# Altium footprint library PcbLib1.PcbLib: 37 footprints (part 1 of 3)
Each footprint in its own frame and in the unit in brackets; x right, y up, seen from the top. Pads: shape width x height; smd on the part's side, far side on the other; paste and mask are expansions set on the pad; w line width, h text height; cw(c..) or ccw(c..) is an arc to the next point about the centre after c.
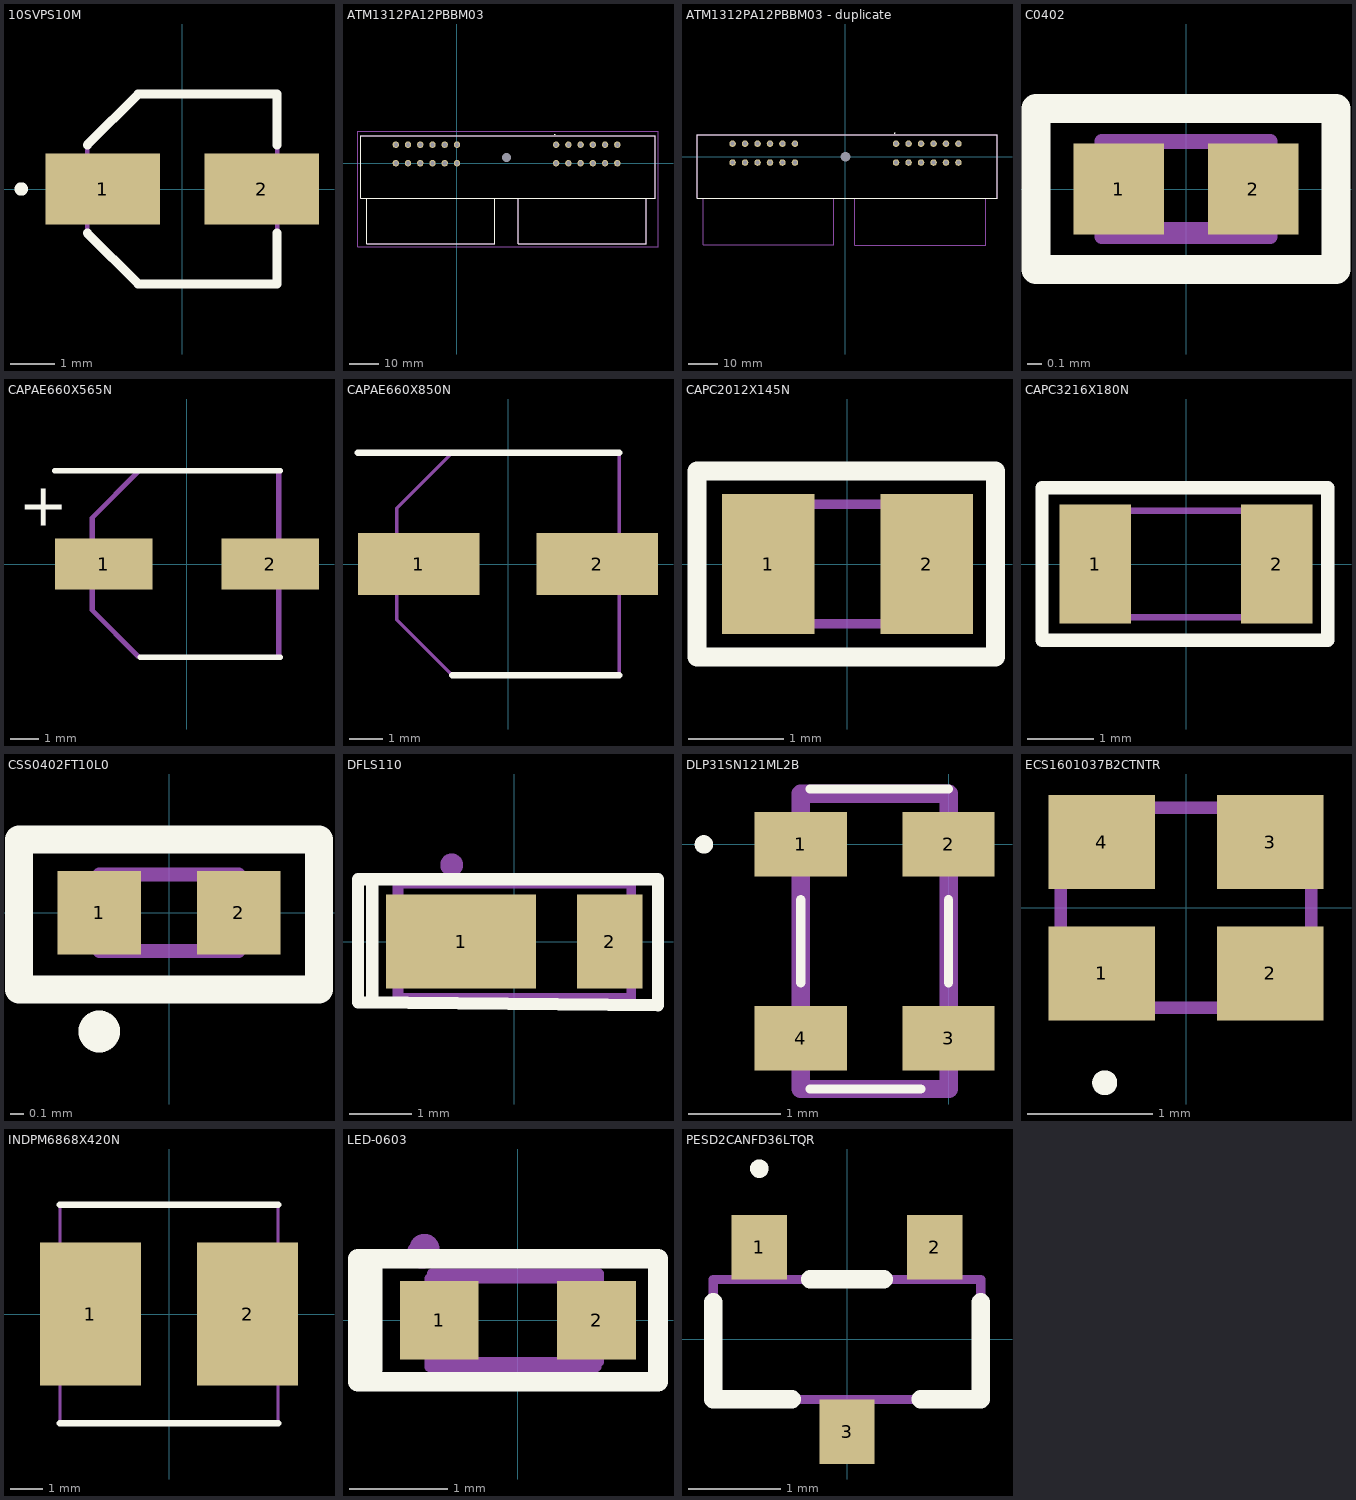
[diagram p0: the footprints below, top view; thin cyan lines are the x and y axes]

## 10SVPS10M [mm]
pads (2):
  rect 2.6x1.6 smd: 1(-1.8,0) 2(1.8,0)
Top Overlay:
  lines w0.2: -2.15,-1 -1,-2.15 2.15,-2.15 2.15,-1 ; -2.15,1 -1,2.15 2.15,2.15 2.15,1 ; -3.7,0 cw(c-3.65,0) -3.6,0 ; -3.7,0 ccw(c-3.65,0) -3.6,0 ; -3.7,0 cw(c-3.65,0) -3.6,0
Mechanical 13:
  lines w0.1: -2.15,-1 -2.15,1 -1,2.15 2.15,2.15 2.15,-2.15 -1,-2.15 -2.15,-1
  text ".Designator" at -2.182,-0.106 h1
3D body "4SVP33M.stp": height 5.43, standoff 0.03, extent -2.5,-2.15 2.5,2.15

## ATM1312PA12PBBM03 [mm]
pads (25):
  round 2.2 hole 1.4: A1(0,0) A2(-4.2,0) A3(-8.4,0) A4(-12.6,0) A5(-16.8,0) A6(-21,0) A7(-21,6.35) A8(-16.8,6.35) A9(-12.6,6.35) A10(-8.4,6.35) A11(-4.2,6.35) A12(0,6.35) B1(34.05,6.35) B2(38.25,6.35) B3(42.45,6.35) B4(46.65,6.35) B5(50.85,6.35) B6(55.05,6.35) B7(55.05,0) B8(50.85,0) B9(46.65,0) B10(42.45,0) B11(38.25,0) B12(34.05,0)
  round 1.6 hole 3.2 unplated: MH1(17.02,1.98)
Top Overlay:
  lines w0.1: -30.98,-11.95 -30.98,-27.65 13.02,-27.65 13.02,-11.95 ; 21.02,-11.95 21.02,-27.65 65.02,-27.65 65.02,-11.95 ; -32.975,-11.95 -32.975,9.35 68.025,9.35 68.025,-11.95 -32.975,-11.95 ; 33.55,9.85 cw(c33.55,9.9) 33.55,9.95 cw(c33.55,9.9) 33.55,9.85
Mechanical 15:
  lines w0.2: -30.98,-11.95 -30.98,-27.65 13.02,-27.65 13.02,-11.95 ; 21.02,-11.95 21.02,-27.65 65.02,-27.65 65.02,-11.95 ; -32.975,-11.95 -32.975,9.35 68.025,9.35 68.025,-11.95 -32.975,-11.95
Mechanical 20:
  lines w0.1: -33.975,-28.65 -33.975,10.95 69.025,10.95 69.025,-28.65 -33.975,-28.65
3D body "c-atm13-12pa-12pb-bm03-3d-c3d.STP": height 15.1, standoff -19.9, extent -36.243,-25.851 72.057,11.049

## ATM1312PA12PBBM03 - duplicate [mm]
pads (25):
  round 2.2 hole 1.4: A1(-17.02,-1.98) A2(-21.22,-1.98) A3(-25.42,-1.98) A4(-29.62,-1.98) A5(-33.82,-1.98) A6(-38.02,-1.98) A7(-38.02,4.37) A8(-33.82,4.37) A9(-29.62,4.37) A10(-25.42,4.37) A11(-21.22,4.37) A12(-17.02,4.37) B1(17.03,4.37) B2(21.23,4.37) B3(25.43,4.37) B4(29.63,4.37) B5(33.83,4.37) B6(38.03,4.37) B7(38.03,-1.98) B8(33.83,-1.98) B9(29.63,-1.98) B10(25.43,-1.98) B11(21.23,-1.98) B12(17.03,-1.98)
  round 1.6 hole 3.2 unplated: ""(0,0)
Top Overlay:
  lines w0.1: -49.995,-13.93 -49.995,7.37 51.005,7.37 51.005,-13.93 -49.995,-13.93 ; 16.53,7.87 cw(c16.53,7.92) 16.53,7.97 cw(c16.53,7.92) 16.53,7.87
Mechanical 13:
  lines w0.2: -47.943,-13.93 -47.943,-29.63 -3.943,-29.63 -3.943,-13.93 ; 3.181,-14.057 3.181,-29.757 47.181,-29.757 47.181,-14.057 ; -49.995,-13.93 -49.995,7.37 51.005,7.37 51.005,-13.93 -49.995,-13.93
  text ".Designator" at -6.098,-7.187 h1.52
3D body "ATM13-12PA-12PB-BM03.stp": height 27.1, standoff -7.9, extent -54.059,-30.653 54.241,6.247

## C0402 [mm]
pads (2):
  rect 0.62x0.62 smd: 1(-0.46,0) 2(0.46,0)
Top Overlay:
  lines w0.2: -1.025,-0.55 -1.025,0.55 1.025,0.55 1.025,-0.55 -1.025,-0.55
Mechanical 13:
  lines w0.1: -0.55,-0.275 -0.55,0.325 0.525,0.325 0.525,-0.275 -0.55,-0.275
  text ".Designator" at -1.125,-0.317 h1
Mechanical 29:
  lines w0.1: -0.575,-0.325 0.575,-0.325 0.575,0.325 -0.575,0.325 -0.575,-0.325
  text "'.Designator'" at -0.7,-0.158 h0.5
Mechanical 30:
  text ".Comment" at -1.075,-1.05 h0.5
3D body "C0402C104K4RAC-TU.stp": height 0.55, standoff 0, extent -0.525,-0.275 0.525,0.275

## CAPAE660X565N [mm]
pads (2):
  rect 3.45x1.8 smd: 1(-2.95,0) 2(2.95,0)
Top Overlay:
  lines w0.2: -4.675,3.3 3.3,3.3 ; -1.65,-3.3 3.3,-3.3
  text "+" at -5.946,1.35 h1.52
Mechanical 13:
  lines w0.1: -3.4,-1.65 -3.4,1.65 -1.75,3.3 3.2,3.3 3.2,-3.3 -1.75,-3.3 -3.4,-1.65
  text ".Designator" at -3.321,-0.763 h1.52
Mechanical 29:
  lines w0.1: -3.3,-1.65 -1.65,-3.3 3.3,-3.3 3.3,3.3 -1.65,3.3 -3.3,1.65 -3.3,-1.65
  text ".Designator" at -3.221,-0.763 h1.52
Mechanical 30:
  text ".Comment" at -3.4,-2.125 h1
3D body "EXV106M050A9GAA.stp": height 5.66, standoff 0, extent -3.8,-3.4 3.8,3.4

## CAPAE660X850N [mm]
pads (2):
  rect 3.6x1.85 smd: 1(-2.65,0) 2(2.65,0)
Top Overlay:
  lines w0.2: -4.45,3.3 3.3,3.3 ; -1.65,-3.3 3.3,-3.3
Mechanical 13:
  lines w0.1: -3.3,-1.65 -3.3,1.65 -1.65,3.3 3.3,3.3 3.3,-3.3 -1.65,-3.3 -3.3,-1.65
  text ".Designator" at -3.457,-0.406 h1
3D body "AHA0608150M050R.stp": height 8, standoff 0.03, extent -3.65,-3.3 3.65,3.3

## CAPC2012X145N [mm]
pads (2):
  rect 0.97x1.47 smd: 1(-0.83,0) 2(0.83,0)
Top Overlay:
  lines w0.2: -1.575,-0.975 -1.575,0.975 1.55,0.975 1.55,-0.975 -1.575,-0.975
Mechanical 13:
  lines w0.1: -1,-0.625 -1,0.625 1,0.625 1,-0.625 -1,-0.625
  text ".Designator" at -1.407,-0.456 h1
3D body "GRM21BR71C475KE51L.stp": height 1.45, standoff 0, extent -1,-0.625 1,0.625

## CAPC3216X180N [mm]
pads (2):
  rect 1.07x1.78 smd: 1(-1.36,0) 2(1.36,0)
Top Overlay:
  lines w0.2: 2.125,1.125 2.125,-1.143 -2.159,-1.143 -2.159,1.143 2.125,1.143
Mechanical 13:
  lines w0.1: -1.6,-0.8 -1.6,0.8 1.6,0.8 1.6,-0.8 -1.6,-0.8
  text ".Designator" at -1.832,-0.356 h1
3D body "EMK316BJ475ML-T.stp": height 1.8, standoff 0, extent -1.6,-0.8 1.6,0.8

## CSS0402FT10L0 [mm]
pads (2):
  rect 0.6x0.6 smd: 1(-0.5,0) 2(0.5,0)
Top Overlay:
  lines w0.2: -0.5,-0.9 cw(c-0.5,-0.85) -0.5,-0.8 ; -0.5,-0.9 ccw(c-0.5,-0.85) -0.5,-0.8 ; -0.5,-0.9 cw(c-0.5,-0.85) -0.5,-0.8 ; -1.075,-0.55 -1.075,0.525 1.075,0.525 1.075,-0.55 -1.075,-0.55
Mechanical 13:
  lines w0.1: -0.5,-0.275 -0.5,0.275 0.5,0.275 0.5,-0.275 -0.5,-0.275
  text ".Designator" at -1.757,-0.306 h1
3D body "RES_CSS0402__005-_02OHM_STP.step": height 0.41, standoff 0, extent -0.572,-0.356 0.572,0.356

## DFLS110 [mm]
pads (2):
  rect 2.4x1.5 smd: 1(-0.85,0)
  rect 1.05x1.5 smd: 2(1.525,0)
Top Overlay:
  lines w0.2: -2.275,-0.95 -2.275,1 -2.5,1 ; -2.5,1 2.3,1 2.3,-1.023 -2.5,-0.969 -2.5,1
Mechanical 13:
  lines w0.1: -1.825,-0.875 -1.825,0.9 1.85,0.9 1.85,-0.875 -1.825,-0.875
  text ".Designator" at -1.625,-0.342 h1
Mechanical 29:
  circle w0.254: c-1,1.225 r0.056
  lines w0.1: -1.9,-0.925 -1.9,0.925 1.9,0.925 1.9,-0.925 -1.9,-0.925
  text ".Designator" at -1.7,-0.283 h0.5
Mechanical 30:
  text ".Comment" at -1.775,-1.3 h0.5
3D body "DFLS1100-7.stp": height 0.98, standoff 0, extent -1.85,-0.9 1.85,0.88

## DLP31SN121ML2B [mm]
pads (4):
  rect 1x0.7 smd: 1(-1.6,0) 2(0,0) 3(0,-2.1) 4(-1.6,-2.1)
Top Overlay:
  lines w0.1: -1.6,-1.5 -1.6,-0.6 ; -1.5,-2.65 -0.3,-2.65 ; -1.5,0.6 0,0.6 ; 0,-1.5 0,-0.6 ; -2.7,0 ccw(c-2.65,0) -2.6,0 ccw(c-2.65,0) -2.7,0
Mechanical 13:
  lines w0.2: -1.6,-2.65 0,-2.65 0,0.55 -1.6,0.55 -1.6,-2.65
  text ".Designator" at -2.3,-1.417 h1
3D body "DLP31SN121ML2L.stp": height 1.4, standoff 0, extent -2.03,-2.65 0.43,0.55

## ECS1601037B2CTNTR [mm]
pads (4):
  rect 0.85x0.75 smd: 1(-0.675,-0.525) 2(0.675,-0.525) 3(0.675,0.525) 4(-0.675,0.525)
Top Overlay:
  lines w0.1: -0.7,-1.4 cw(c-0.65,-1.4) -0.6,-1.4 cw(c-0.65,-1.4) -0.7,-1.4
Mechanical 13:
  lines w0.1: -1,-0.8 1,-0.8 1,0.8 -1,0.8 -1,-0.8
  text ".Designator" at -1.207,-0.406 h1
3D body "ECS-160-10-37B2-CTN-TR.stp": height 0.6, standoff 0, extent -1.025,-0.825 1.025,0.825

## INDPM6868X420N [mm]
pads (2):
  rect 3.15x4.45 smd: 1(-2.45,0) 2(2.45,0)
Top Overlay:
  lines w0.2: -3.4,-3.4 3.4,-3.4 ; -3.4,3.4 3.4,3.4
Mechanical 13:
  lines w0.1: -3.4,-3.4 3.4,-3.4 3.4,3.4 -3.4,3.4 -3.4,-3.4
  text ".Designator" at -3.532,-0.206 h1
3D body "SRR6838A-150M.stp": height 4.2, standoff 0, extent -3.4,-3.4 3.4,3.4

## LED-0603 [mm]
pads (2):
  rect 0.8x0.8 smd: 1(-0.8,0) 2(0.8,0)
Top Overlay:
  lines w0.2: -1.475,-0.5 -1.475,0.512 ; -1.625,-0.625 -1.625,0.625 1.425,0.625 1.425,-0.625 -1.625,-0.625
Mechanical 13:
  circle w0.254: c-0.95,0.725 r0.025
  lines w0.1: -0.875,-0.425 0.825,-0.425 0.825,0.475 -0.875,0.475 -0.875,-0.425
  text ".Designator" at -0.55,-0.208 h0.5
Mechanical 29:
  circle w0.254: c-0.975,0.675 r0.025
  lines w0.1: -0.9,-0.475 0.8,-0.475 0.8,0.425 -0.9,0.425 -0.9,-0.475
  text ".Designator" at -0.575,-0.258 h0.5
Mechanical 30:
  text ".Comment" at -1.35,-0.95 h0.5
3D body "150060AS75000.STEP": height 0.81, standoff 0.01, extent -0.85,-0.425 0.75,0.375

## PCBComponent_1 [mm]

## PESD2CANFD36LTQR [mm]
pads (3):
  rect 0.6x0.7 smd: 1(-0.95,1) 2(0.95,1) 3(0,-1)
Top Overlay:
  lines w0.1: -0.95,1.8 cw(c-0.95,1.85) -0.95,1.9 cw(c-0.95,1.85) -0.95,1.8
  lines w0.2: -1.45,0.4 -1.45,-0.65 -0.6,-0.65 ; -0.4,0.65 0.4,0.65 ; 0.8,-0.65 1.45,-0.65 1.45,0.4
Mechanical 13:
  lines w0.1: -1.45,-0.65 -1.45,0.65 1.45,0.65 1.45,-0.65 -1.45,-0.65
  text ".Designator" at -1.3,-0.283 h0.5
3D body "PESD2CANFD36LT-QR.stp": height 1.2, standoff 0, extent -1.45,-1.29 1.45,1.29